# Altium footprint library QBFX2_Carrier.PcbLib: 8 footprints
Each footprint in its own frame and in the unit in brackets; x right, y up, seen from the top. Pads: shape width x height; smd on the part's side, far side on the other; paste and mask are expansions set on the pad; w line width, h text height; cw(c..) or ccw(c..) is an arc to the next point about the centre after c.
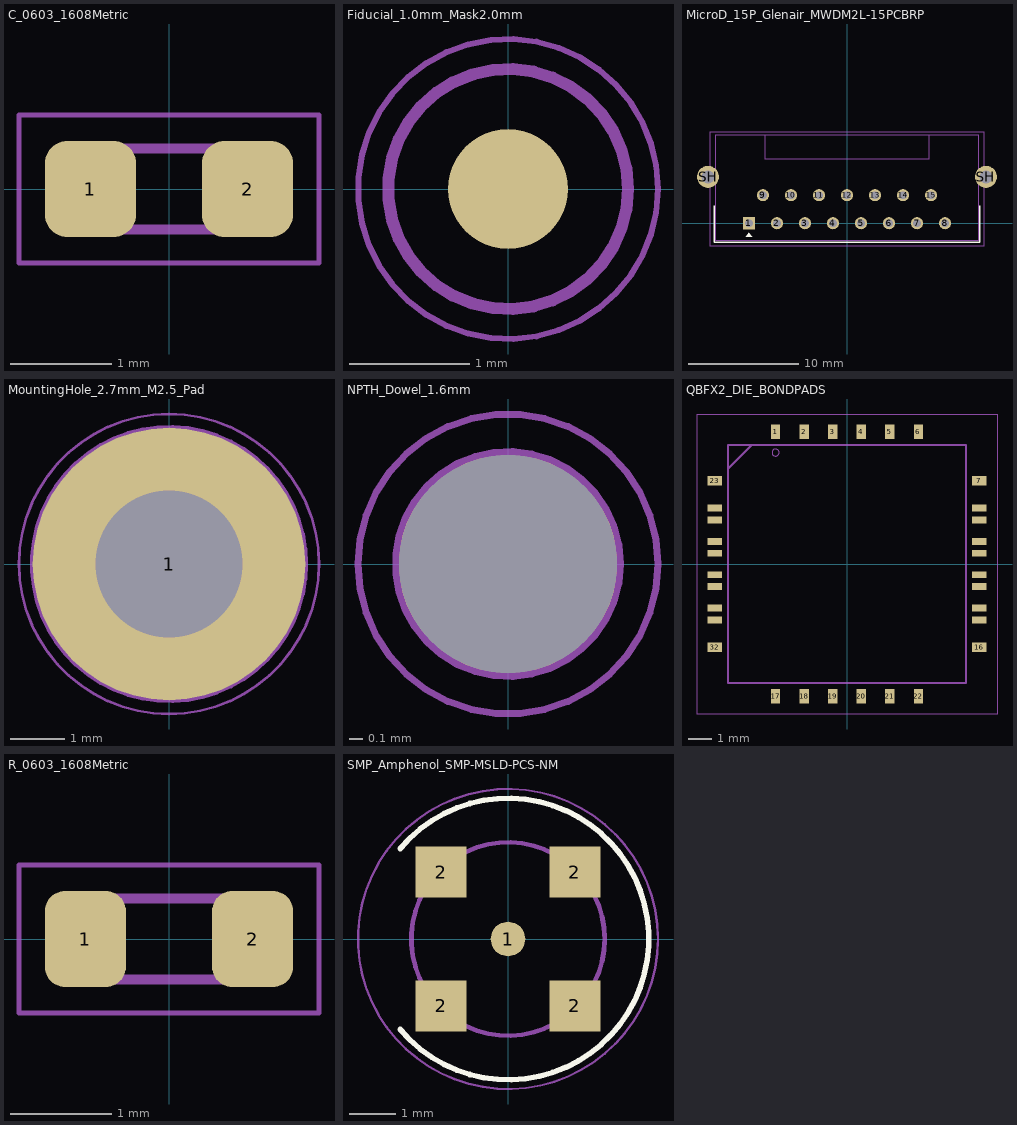
[diagram p0: the footprints below, top view; thin cyan lines are the x and y axes]

## C_0603_1608Metric [mm] "Capacitor 0603 (1608 metric), C0G"
pads (2):
  rrect50% 0.9x0.95 smd: 1(-0.775,0) 2(0.775,0)
Top Overlay:
  text ".Designator" at 0,1.075 h1
Top Assembly:
  lines w0.1: -0.8,-0.4 0.8,-0.4 0.8,0.4 -0.8,0.4 -0.8,-0.4
Top Courtyard:
  lines w0.05: -1.48,-0.73 1.48,-0.73 1.48,0.73 -1.48,0.73 -1.48,-0.73
3D body "C_0603.step": height 0, standoff 0, extent -1.225,-0.475 1.225,0.475

## Fiducial_1.0mm_Mask2.0mm [mm] "Fiducial 1.0 mm Cu dot, 2.0 mm mask opening"
pads (1):
  round 1 smd paste-0.55 mask+0.5: ""(0,0)
Top Overlay:
  text ".Designator" at 0,1.1 h1
Top Assembly:
  circle w0.1: c0,0 r1
Top Courtyard:
  circle w0.05: c0,0 r1.25

## MicroD_15P_Glenair_MWDM2L-15PCBRP [mm] "Micro-D 15 pin plug, right-angle PCB (Glenair MWDM2L-15PCBRP-.110). Tails on a 2.54 mm grid, 2 rows (8+7). Land pattern and pin-to-tail map TO CONFIRM against the Glenair drawing."
pads (17):
  rect 1.1x1.1 hole 0.7: 1(-8.89,0)
  round 1.1 hole 0.7: 2(-6.35,0) 3(-3.81,0) 4(-1.27,0) 5(1.27,0) 6(3.81,0) 7(6.35,0) 8(8.89,0) 9(-7.62,2.54) 10(-5.08,2.54) 11(-2.54,2.54) 12(0,2.54) 13(2.54,2.54) 14(5.08,2.54) 15(7.62,2.54)
  round 2 hole 1.2: SH(-12.6,4.2) SH(12.6,4.2)
Top Overlay:
  region: -9.19,-1.25 -8.59,-1.25 -8.89,-0.85
  lines w0.12: -12.05,1.6 -12.05,-1.75 12.05,-1.75 12.05,1.6
  text ".Designator" at 0,5.8 h1
Top Assembly:
  lines w0.1: -11.9,-1.6 11.9,-1.6 11.9,8 -11.9,8 -11.9,-1.6 ; -7.4,5.8 7.4,5.8 7.4,8 -7.4,8 -7.4,5.8
Top Courtyard:
  lines w0.05: -12.4,-2.1 12.4,-2.1 12.4,8.3 -12.4,8.3 -12.4,-2.1
3D body "MicroD_15P_RA.step": height 0, standoff 0, extent -13.6,-0.55 13.6,5.2

## MountingHole_2.7mm_M2.5_Pad [mm] "Mounting hole M2.5, plated, pad 5 mm, GND"
pads (1):
  round 5 hole 2.7: 1(0,0)
Top Overlay:
  text ".Designator" at 0,3.1 h1
Top Assembly:
  circle w0.1: c0,0 r2.5
Top Courtyard:
  circle w0.05: c0,0 r2.75

## NPTH_Dowel_1.6mm [mm] "Non-plated 1.6 mm hole for a 1.5 mm alignment dowel in the sample-holder base"
pads (1):
  round 1.6 hole 1.6 unplated: ""(0,0)
Top Overlay:
  text ".Designator" at 0,1.4 h1
Top Assembly:
  circle w0.1: c0,0 r0.8
Top Courtyard:
  circle w0.05: c0,0 r1.1

## QBFX2_DIE_BONDPADS [mm] "QBF-X2 10 x 10 mm die in a 10.30 mm through-window: 32 PCB wire-bond landing pads (Cu, no paste) numbered as circuits/die_pads.json (rev B: 0.29 mm lands for the differential pairs). Die rests on the sample-holder pedestal."
pads (32):
  rect 0.39x0.6 smd paste-0.245: 1(-3,5.55) 2(-1.8,5.55) 3(-0.6,5.55) 4(0.6,5.55) 5(1.8,5.55) 6(3,5.55) 17(-3,-5.55) 18(-1.8,-5.55) 19(-0.6,-5.55) 20(0.6,-5.55) 21(1.8,-5.55) 22(3,-5.55)
  rect 0.6x0.39 smd paste-0.245: 7(5.55,3.5) 16(5.55,-3.5) 23(-5.55,3.5) 32(-5.55,-3.5)
  rect 0.6x0.29 smd paste-0.195: 8(5.55,2.35) 9(5.55,1.85) 10(5.55,0.95) 11(5.55,0.45) 12(5.55,-0.45) 13(5.55,-0.95) 14(5.55,-1.85) 15(5.55,-2.35) 24(-5.55,2.35) 25(-5.55,1.85) 26(-5.55,0.95) 27(-5.55,0.45) 28(-5.55,-0.45) 29(-5.55,-0.95) 30(-5.55,-1.85) 31(-5.55,-2.35)
Top Overlay:
  text ".Designator" at 0,6.45 h1
Top Assembly:
  circle w0.05: c-3,4.68 r0.15
  lines w0.1: -5,5 5,5 5,-5 -5,-5 -5,5 ; -5,5 -5,4 -4,5 -5,5
Top Courtyard:
  lines w0.05: -6.3,-6.3 6.3,-6.3 6.3,6.3 -6.3,6.3 -6.3,-6.3
3D body "QBFX2_die_bonded.step": height 0, standoff 0, extent -5.85,-5.85 5.85,5.85

## R_0603_1608Metric [mm] "Resistor 0603 (1608 metric), thin film"
pads (2):
  rrect50% 0.8x0.95 smd: 1(-0.825,0) 2(0.825,0)
Top Overlay:
  text ".Designator" at 0,1.075 h1
Top Assembly:
  lines w0.1: -0.8,-0.4 0.8,-0.4 0.8,0.4 -0.8,0.4 -0.8,-0.4
Top Courtyard:
  lines w0.05: -1.48,-0.73 1.48,-0.73 1.48,0.73 -1.48,0.73 -1.48,-0.73
3D body "R_0603.step": height 0, standoff 0, extent -1.225,-0.475 1.225,0.475

## SMP_Amphenol_SMP-MSLD-PCS-NM [mm] "SMP straight PCB jack, surface mount, non-magnetic (Amphenol RF SMP-MSLD-PCS-NM). Generic land pattern: confirm against the vendor drawing before release. GCPW enters from local -x."
pads (5):
  round 0.75 smd: 1(0,0)
  rect 1.1x1.1 smd: 2(-1.45,-1.45) 2(-1.45,1.45) 2(1.45,-1.45) 2(1.45,1.45)
Top Overlay:
  lines w0.12: -2.336,-1.96 ccw(c0,0) -2.336,1.96
  text ".Designator" at 0,2.6 h1
Top Assembly:
  circle w0.1: c0,0 r2.095
  circle w0.05: c0,0 r0.25
Top Courtyard:
  circle w0.05: c0,0 r3.25
3D body "SMP_MSLD_PCS_NM.step": height 0, standoff 0, extent -2,-2 2,2